# EAGLE library part IC_DAC084S085 (library dp_devices.v6)
8-Bit micropower quad digital-to-analog converter with rail-to-rail output
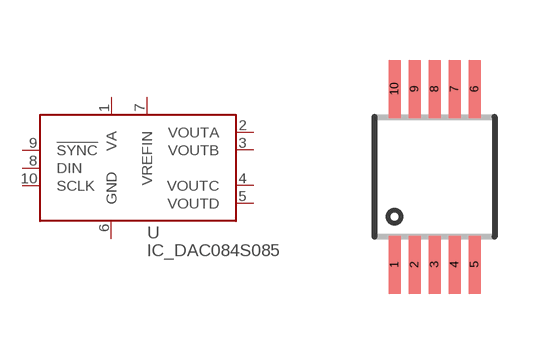
[diagram p216: symbol with the pads of VSSOP-10; footprint VSSOP-10]

Designator prefix U

## IC_DAC084S085  [VSSOP-10]
1  VA  pwr
2  VOUTA  out
3  VOUTB  out
4  VOUTC  out
5  VOUTD  out
6  GND  pwr
7  VREFIN  in
8  DIN  in
9  !SYNC  in
10  SCLK  in

## Footprint VSSOP-10 (pad centres in mm)
Very Small plastic small outline pin pitch 0.5mm
smd 0.3 x 1.45: 1 -1,-2.2; 2 -0.5,-2.2; 3 0,-2.2; 4 0.5,-2.2; 5 1,-2.2; 6 1,2.2; 7 0.5,2.2; 8 0,2.2; 9 -0.5,2.2; 10 -1,2.2